# Altium footprint library Connector_SMD.PcbLib: 116 footprints (part 6 of 8)
Each footprint in its own frame and in the unit in brackets; x right, y up, seen from the top. Pads: shape width x height; smd on the part's side, far side on the other; paste and mask are expansions set on the pad; w line width, h text height; cw(c..) or ccw(c..) is an arc to the next point about the centre after c.
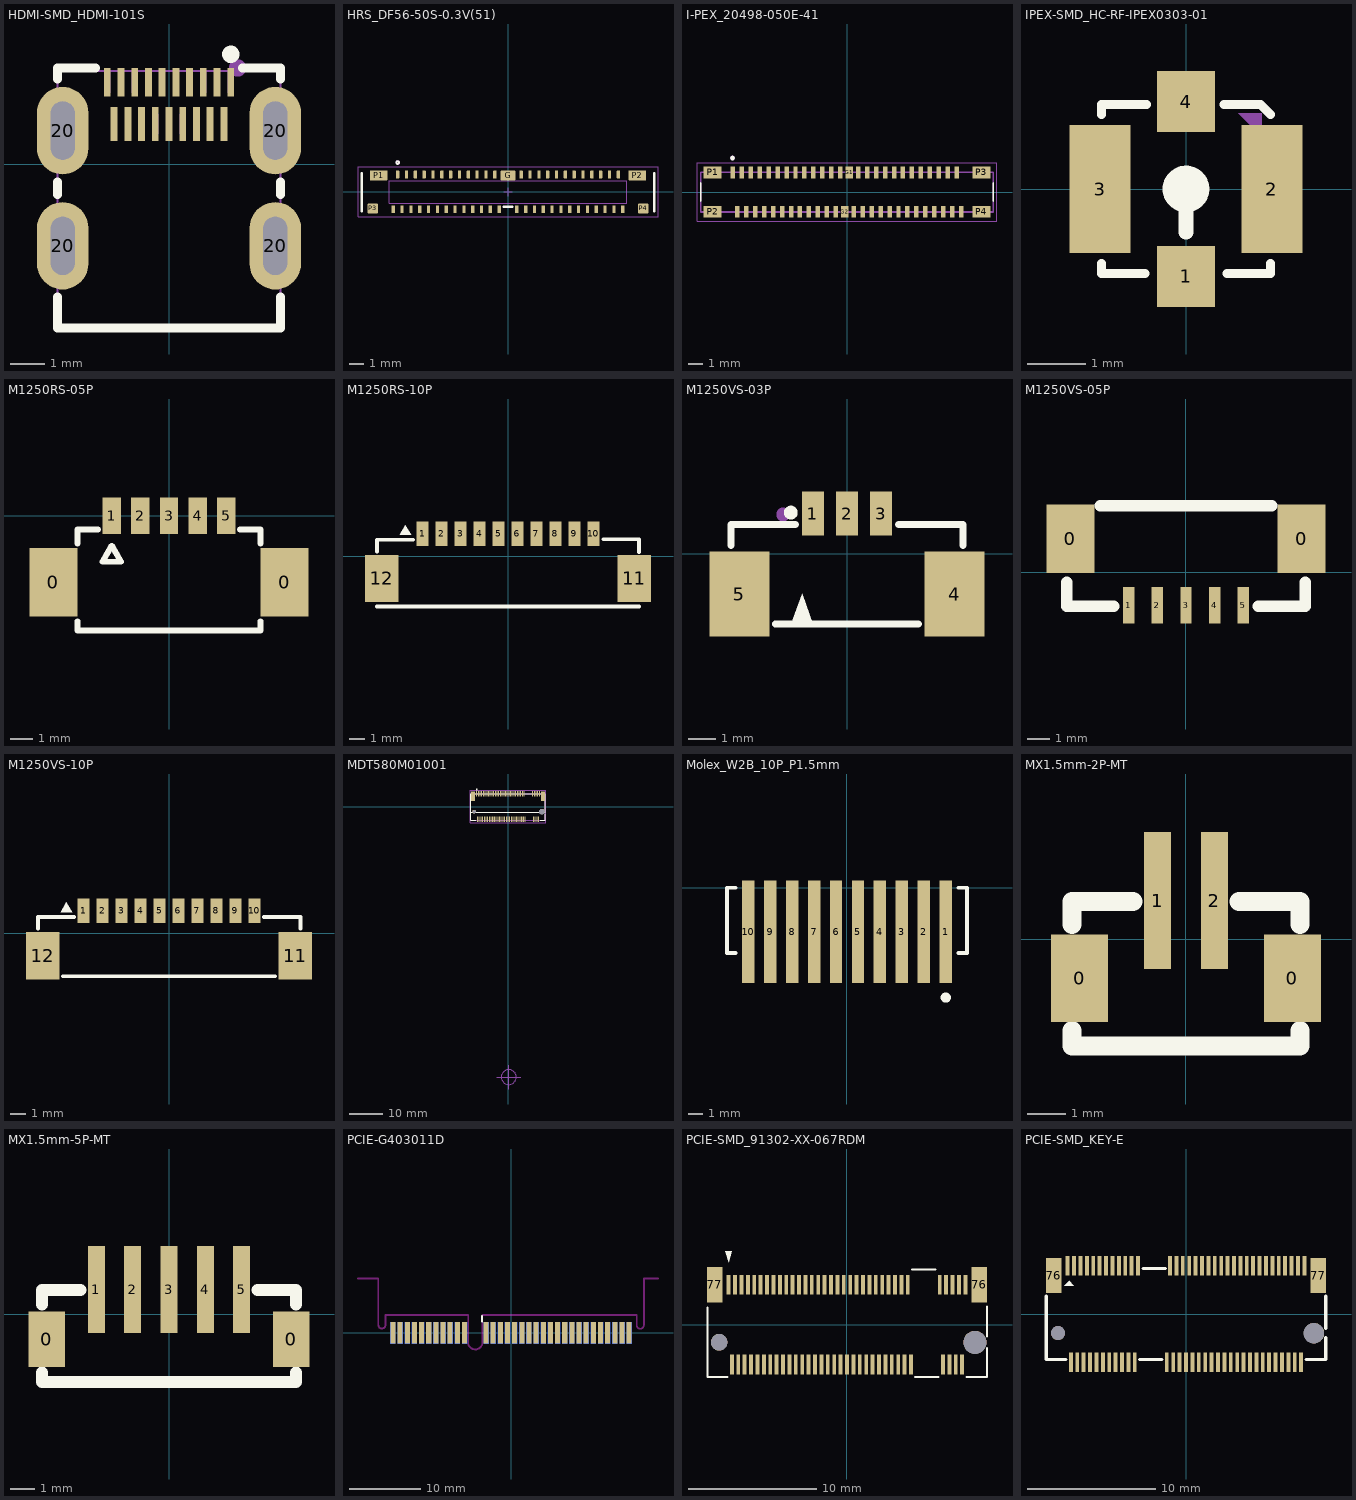
[diagram p5: the footprints below, top view; thin cyan lines are the x and y axes]

## HDMI-SMD_HDMI-101S [mm]
pads (23):
  rect 0.2x0.84 smd paste-100 mask+0.051: 1(1.8,2.385) 3(1.4,2.385) 5(1,2.385) 7(0.6,2.385) 9(0.2,2.385) 11(-0.2,2.385) 13(-0.6,2.385) 15(-1,2.385) 17(-1.4,2.385) 19(-1.8,2.385)
  rect 0.2x1 smd paste-100 mask+0.051: 2(1.6,1.165) 4(1.2,1.165) 6(0.8,1.165) 8(0.4,1.165) 10(0,1.165) 12(-0.4,1.165) 14(-0.8,1.165) 16(-1.2,1.165) 18(-1.6,1.165)
  oval 1.5x2.55 hole 0.7 slot 1.7 at 90 deg: 20(-3.1,-2.385) 20(-3.1,0.975) 20(3.1,-2.385) 20(3.1,0.975)
Top Overlay:
  circle w0.254: c1.8,3.2 r0.127
  lines w0.254: -3.25,-3.879 -3.25,-4.785 3.25,-4.785 3.25,-3.879 ; -3.25,-0.89 -3.25,-0.52 ; -3.25,2.47 -3.25,2.8 -2.146,2.8 ; 2.146,2.8 3.25,2.8 3.25,2.47 ; 3.25,-0.89 3.25,-0.52
Top Paste:
  drawing of 23 lines, arcs and shapes, not listed
Mechanical 6:
  circle w0.254: c2,2.8 r0.127
Mechanical 15:
  region: 3.31,2.715 3.31,2.74 3.275,2.775 3.225,2.775 3.19,2.74 3.19,2.715 3.19,2.69 3.225,2.655 3.275,2.655 3.31,2.69 3.31,2.715
  region: -1.68,1.465 -1.52,1.465 -1.52,0.865 -1.68,0.865
  region: -1.48,2.685 -1.32,2.685 -1.32,2.085 -1.48,2.085
  region: -1.28,1.465 -1.12,1.465 -1.12,0.865 -1.28,0.865
  region: -1.08,2.685 -0.92,2.685 -0.92,2.085 -1.08,2.085
  region: -0.88,1.465 -0.72,1.465 -0.72,0.865 -0.88,0.865
  region: -0.68,2.685 -0.52,2.685 -0.52,2.085 -0.68,2.085
  region: -0.48,1.465 -0.32,1.465 -0.32,0.865 -0.48,0.865
  region: -0.28,2.685 -0.12,2.685 -0.12,2.085 -0.28,2.085
  region: -0.08,1.465 0.08,1.465 0.08,0.865 -0.08,0.865
  region: 0.12,2.685 0.28,2.685 0.28,2.085 0.12,2.085
  region: 0.32,1.465 0.48,1.465 0.48,0.865 0.32,0.865
  region: 0.52,2.685 0.68,2.685 0.68,2.085 0.52,2.085
  region: 0.72,1.465 0.88,1.465 0.88,0.865 0.72,0.865
  region: 0.92,2.685 1.08,2.685 1.08,2.085 0.92,2.085
  region: 1.12,1.465 1.28,1.465 1.28,0.865 1.12,0.865
  region: 1.32,2.685 1.48,2.685 1.48,2.085 1.32,2.085
  region: 1.52,1.465 1.68,1.465 1.68,0.865 1.52,0.865
  region: 1.72,2.685 1.88,2.685 1.88,2.085 1.72,2.085
  region: -1.88,2.685 -1.72,2.685 -1.72,2.085 -1.88,2.085
  region: -3.25,1.525 -2.95,1.525 -2.95,0.425 -3.25,0.425
  region: 2.95,1.525 3.25,1.525 3.25,0.425 2.95,0.425
  region: 2.95,-1.785 3.25,-1.785 3.25,-2.985 2.95,-2.985
  region: -3.25,-1.785 -2.95,-1.785 -2.95,-2.985 -3.25,-2.985
  lines w0.051: -3.25,-4.785 3.25,-4.785 3.25,2.715 -3.25,2.715 -3.25,-4.785
3D body "PCBModelHDMI-SMD_HDMI-101S.step": height 3.05, standoff -0.7, extent -3.25,-4.74 3.26,2.76

## HRS_DF56-50S-0.3V(51) [mm]
pads (55):
  rrect20% 0.22x0.52 smd mask+0.05: 1(-7.5,1.185) 2(-6.9,1.185) 3(-6.3,1.185) 4(-5.7,1.185) 5(-5.1,1.185) 6(-4.5,1.185) 7(-3.9,1.185) 8(-3.3,1.185) 9(-2.7,1.185) 10(-2.1,1.185) 11(-1.5,1.185) 12(-0.9,1.185) 13(0.9,1.185) 14(1.5,1.185) 15(2.1,1.185) 16(2.7,1.185) 17(3.3,1.185) 18(3.9,1.185) 19(4.5,1.185) 20(5.1,1.185) 21(5.7,1.185) 22(6.3,1.185) 23(6.9,1.185) 24(7.5,1.185) 25(-7.8,-1.185) 26(-7.2,-1.185) 27(-6.6,-1.185) 28(-6,-1.185) 29(-5.4,-1.185) 30(-4.8,-1.185) 31(-4.2,-1.185) 32(-3.6,-1.185) 33(-3,-1.185) 34(-2.4,-1.185) 35(-1.8,-1.185) 36(-1.2,-1.185) 37(-0.6,-1.185) 38(0.6,-1.185) 39(1.2,-1.185) 40(1.8,-1.185) 41(2.4,-1.185) 42(3,-1.185) 43(3.6,-1.185) 44(4.2,-1.185) 45(4.8,-1.185) 46(5.4,-1.185) 47(6,-1.185) 48(6.6,-1.185) 49(7.2,-1.185) 50(7.8,-1.185)
  rrect20% 1x0.7 smd mask+0.05: G(0,1.125)
  rrect20% 1.2x0.7 smd mask+0.05: P1(-8.8,1.125) P2(8.8,1.125)
  rrect20% 0.7x0.7 smd mask+0.05: P3(-9.2,-1.125) P4(9.2,-1.125)
Top Overlay:
  circle w0.127: c-7.5,2 r0.089
  lines w0.152: -9.95,-1.31 -9.95,1.29 ; -0.3,-1 0.3,-1 ; 9.95,-1.31 9.95,1.29
Mechanical 7:
  lines w0.051: -8.06,-0.775 -8.06,0.775 8.06,0.775 8.06,-0.775 -8.06,-0.775
Mechanical 13:
  circle w0.127: c-7.5,2 r0.1
Mechanical 15:
  lines w0.051: -0.3,0 0.3,0 ; 0,-0.3 0,0.3 ; -10.2,-1.7 -10.2,1.7 10.2,1.7 10.2,-1.7 -10.2,-1.7
3D body "DF56-50S-0.3V.stp": height 1.24, standoff -0.01, extent -9.95,-1.31 9.95,1.29

## I-PEX_20498-050E-41 [mm]
pads (56):
  rect 0.3x0.8 smd paste-1: 1(-7.65,1.32) 2(-7.35,-1.32) 3(-7.05,1.32) 4(-6.75,-1.32) 5(-6.45,1.32) 6(-6.15,-1.32) 7(-5.85,1.32) 8(-5.55,-1.32) 9(-5.25,1.32) 10(-4.95,-1.32) 11(-4.65,1.32) 12(-4.35,-1.32) 13(-4.05,1.32) 14(-3.75,-1.32) 15(-3.45,1.32) 16(-3.15,-1.32) 17(-2.85,1.32) 18(-2.55,-1.32) 19(-2.25,1.32) 20(-1.95,-1.32) 21(-1.65,1.32) 22(-1.35,-1.32) 23(-1.05,1.32) 24(-0.75,-1.32) 25(-0.45,1.32) 26(0.45,-1.32) 27(0.75,1.32) 28(1.05,-1.32) 29(1.35,1.32) 30(1.65,-1.32) 31(1.95,1.32) 32(2.25,-1.32) 33(2.55,1.32) 34(2.85,-1.32) 35(3.15,1.32) 36(3.45,-1.32) 37(3.75,1.32) 38(4.05,-1.32) 39(4.35,1.32) 40(4.65,-1.32) 41(4.95,1.32) 42(5.25,-1.32) 43(5.55,1.32) 44(5.85,-1.32) 45(6.15,1.32) 46(6.45,-1.32) 47(6.75,1.32) 48(7.05,-1.32) 49(7.35,1.32) 50(7.65,-1.32)
  rect 0.5x0.8 smd paste-1: G1(0.15,1.32) G2(-0.15,-1.32)
  rect 1.2x0.8 smd paste-2: P1(-9,1.32) P2(-9,-1.32) P3(9,1.32) P4(9,-1.32)
Top Overlay:
  circle w0.127: c-7.67,2.28 r0.089
  lines w0.127: -9.8,-0.6 -9.8,0.6 ; 9.8,-0.6 9.8,0.6
Top Paste:
  drawing of 56 lines, arcs and shapes, not listed
Mechanical 13:
  circle w0.127: c-7.67,2.28 r0.1
  lines w0.127: -9.8,-1.325 -9.8,1.325 9.8,1.325 9.8,-1.325 -9.8,-1.325
Mechanical 15:
  lines w0.05: -10.05,-1.97 -10.05,1.97 10.05,1.97 10.05,-1.97 -10.05,-1.97
3D body "20496-050xxxC+20498-050ExxxC MATING STEP R1R2 ALL.STEP": height 1.24, standoff -0.03, extent -10,-3.04 10,1.45

## IPEX-SMD_HC-RF-IPEX0303-01 [mm]
pads (4):
  rect 1x1.05 smd: 1(0,-1.5) 4(0,1.5)
  rect 1.05x2.2 smd: 2(1.475,0) 3(-1.475,0)
Top Overlay:
  circle w0.4: c0,0 r0.2
  lines w0.152: -1.45,-1.28 -1.45,-1.3 -1.45,-1.45 -0.701,-1.45 ; -1.45,1.28 -1.45,1.4 -1.45,1.45 -1.4,1.45 -0.68,1.45 ; 0.65,1.45 1.1,1.45 1.28,1.45 1.45,1.28 1.447,1.28 1.277,1.45 ; 0.701,-1.45 1.097,-1.45 1.45,-1.45 1.45,-1.3 1.45,-1.28
  lines w0.254: 0,-0.744 0,-0.3
Mechanical 15:
  circle w0.4: c0,-1.45 r0.2
  region: 1.3,0.9 1.3,1.3 0.9,1.3

## M1250RS-05P [mm]
pads (7):
  rect 2.1x3 smd: 0(-5.05,-2.9) 0(5.05,-2.9)
  rect 0.8x1.6 smd: 1(-2.5,0) 2(-1.25,0) 3(0,0) 4(1.25,0) 5(2.5,0)
Top Overlay:
  lines w0.254: -4,-4.6 -4,-5 4,-5 4,-4.6 ; -4,-1.2 -4,-0.6 -3.1,-0.6 ; 3.1,-0.6 4,-0.6 4,-1.2 ; -2.9,-2 -2.1,-2 -2.5,-1.3 -2.9,-2
3D body: height 3.7, standoff 0, extent -4,-5 4,-0.6

## M1250RS-10P [mm]
pads (12):
  rect 0.8x1.6 smd: 1(-5.625,1.475) 2(-4.375,1.475) 3(-3.125,1.475) 4(-1.875,1.475) 5(-0.625,1.475) 6(0.625,1.475) 7(1.875,1.475) 8(3.125,1.475) 9(4.375,1.475) 10(5.625,1.475)
  rect 2.2x3.1 smd: 11(8.325,-1.475) 12(-8.325,-1.475)
Top Overlay:
  region: -6.751,2.032 -7.132,1.397 -6.37,1.397
  lines w0.254: -8.625,-3.325 8.625,-3.325 ; -8.625,0.306 -8.625,1.075 -6.256,1.075 ; 6.27,1.1 8.63,1.1 8.63,0.263
3D body "CN1.stp": height 3.41, standoff 0, extent -8.675,-3.475 8.675,1.675

## M1250VS-03P [mm]
pads (5):
  rect 0.8x1.6 smd: 1(-1.25,1.475) 2(0,1.475) 3(1.25,1.475)
  rect 2.2x3.1 smd: 4(3.95,-1.475) 5(-3.95,-1.475)
Top Overlay:
  circle w0.254: c-2.06,1.51 r0.127
  region: -2.05,-2.575 -1.25,-2.575 -1.65,-1.475
  lines w0.254: -4.25,0.306 -4.25,1.075 -1.881,1.075 ; -2.63,-2.58 2.62,-2.58 ; 1.881,1.075 4.25,1.075 4.25,0.306
Mechanical 15:
  circle w0.254: c-2.34,1.44 r0.127
3D body "CN1.stp": height 4.7, standoff 0, extent -4.45,-2.7 4.45,1.4

## M1250VS-05P [mm]
pads (7):
  rect 2.1x3 smd: 0(-5.05,1.45) 0(5.05,1.45)
  rect 0.5x1.6 smd: 1(-2.5,-1.45) 2(-1.25,-1.45) 3(0,-1.45) 4(1.25,-1.45) 5(2.5,-1.45)
Top Overlay:
  lines w0.5: -5.2,-0.45 -5.2,-1.5 -3.15,-1.5 ; -3.75,2.9 3.75,2.9 ; 3.15,-1.5 5.2,-1.5 5.2,-0.45
3D body: height 4.7, standoff 0, extent -5.2,-1.5 5.2,2.9

## M1250VS-10P [mm]
pads (12):
  rect 0.8x1.6 smd: 1(-5.625,1.475) 2(-4.375,1.475) 3(-3.125,1.475) 4(-1.875,1.475) 5(-0.625,1.475) 6(0.625,1.475) 7(1.875,1.475) 8(3.125,1.475) 9(4.375,1.475) 10(5.625,1.475)
  rect 2.2x3.1 smd: 11(8.325,-1.475) 12(-8.325,-1.475)
Top Overlay:
  region: -6.751,2.032 -7.132,1.397 -6.37,1.397
  lines w0.254: -8.625,0.306 -8.625,1.075 -6.256,1.075 ; -6.994,-2.825 6.994,-2.825 ; 6.25,1.07 8.648,1.07 8.648,0.303
Mechanical 15:
  circle w0.2: c-5.729,1.987 r0.1
3D body "CN1.stp": height 4.75, standoff 0, extent -8.675,-2.226 8.675,1.475

## MDT580M01001 [mm]
pads (71):
  rect 0.3x1.55 smd: 1(-9.25,3.775) 2(-9,-3.775) 3(-8.75,3.775) 4(-8.5,-3.775) 5(-8.25,3.775) 6(-8,-3.775) 7(-7.75,3.775) 8(-7.5,-3.775) 9(-7.25,3.775) 10(-7,-3.775) 11(-6.75,3.775) 12(-6.5,-3.775) 13(-6.25,3.775) 14(-6,-3.775) 15(-5.75,3.775) 16(-5.5,-3.775) 17(-5.25,3.775) 18(-5,-3.775) 19(-4.75,3.775) 20(-4.5,-3.775) 21(-4.25,3.775) 22(-4,-3.775) 23(-3.75,3.775) 24(-3.5,-3.775) 25(-3.25,3.775) 26(-3,-3.775) 27(-2.75,3.775) 28(-2.5,-3.775) 29(-2.25,3.775) 30(-2,-3.775) 31(-1.75,3.775) 32(-1.5,-3.775) 33(-1.25,3.775) 34(-1,-3.775) 35(-0.75,3.775) 36(-0.5,-3.775) 37(-0.25,3.775) 38(0,-3.775) 39(0.25,3.775) 40(0.5,-3.775) 41(0.75,3.775) 42(1,-3.775) 43(1.25,3.775) 44(1.5,-3.775) 45(1.75,3.775) 46(2,-3.775) 47(2.25,3.775) 48(2.5,-3.775) 49(2.75,3.775) 50(3,-3.775) 51(3.25,3.775) 52(3.5,-3.775) 53(3.75,3.775) 54(4,-3.775) 55(4.25,3.775) 56(4.5,-3.775) 57(4.75,3.775) 58(5,-3.775) 67(7.25,3.775) 68(7.5,-3.775) 69(7.75,3.775) 70(8,-3.775) 71(8.25,3.775) 72(8.5,-3.775) 73(8.75,3.775) 74(9,-3.775) 75(9.25,3.775)
  round 1.1 hole 1.1 unplated: None(-10,-1.5)
  round 1.6 hole 1.6 unplated: None(10,-1.5)
  rect 1.2x2.75 smd: SH1(-10.35,3) SH2(10.35,3)
Top Overlay:
  circle w0.2: c-9.225,5.075 r0.1
  lines w0.1: -10.95,-4 -10.95,-1.75 -8.76,-1.75
  lines w0.127: -10.95,1 -10.95,-4 -9.5,-4 ; -10.575,3.75 -6.175,3.75 ; -6.075,3.75 10.575,3.75 10.95,3.75 ; 6.075,-1.75 -10.575,-1.75 -10.95,-1.75 ; 6.175,-1.75 10.575,-1.75 10.95,-1.75 ; 9.5,-4 10.95,-4 10.95,-2.1 ; 10.95,-0.9 10.95,1 ; -10.95,-1.75 -10.95,3.75 ; -10.95,-1.75 -10.95,3.75 ; -10.95,3.75 10.95,3.75 ; 10.95,-1.75 10.95,3.75 ; 10.95,-1.75 10.95,3.75
Mechanical 3:
  circle w0.2: c0.223,-79.843 r2.209
  lines w0.2: -3.298,-79.843 0.223,-79.843 ; 0.223,-83.364 0.223,-79.843 ; 0.223,-76.323 0.223,-79.843 ; 3.743,-79.843 0.223,-79.843
Mechanical 4:
  circle w0.2: c-9.25,4.115 r0.1
  circle w0.2: c-9.25,4.115 r0.1
  lines w0.127: -10.95,-4 10.95,-4 ; -10.95,-4 -10.95,3.75 ; -10.95,-4 10.95,-4 ; -10.95,-4 -10.95,3.75 ; -10.95,3.75 10.95,3.75 ; -10.95,3.75 10.95,3.75 ; 10.95,-4 10.95,3.75 ; 10.95,-4 10.95,3.75
Mechanical 16:
  lines w0.05: -11.2,-4.8 11.2,-4.8 11.2,4.8 -11.2,4.8 -11.2,-4.8
3D body "M-mdt580m0x001.step": height 5.95, standoff -0.6, extent -10.99,-4.27 11.01,4.28

## Molex_W2B_10P_P1.5mm [mm]
pads (10):
  rect 0.85x7 smd paste-1 mask+0.102: 1(6.75,-3)
  rect 0.85x7 smd paste-1: 2(5.25,-3) 3(3.75,-3) 4(2.25,-3) 5(0.75,-3) 6(-0.75,-3) 7(-2.25,-3) 8(-3.75,-3) 9(-5.25,-3) 10(-6.75,-3)
Top Overlay:
  circle w0.5: c6.75,-7.5 r0.1
  lines w0.254: -7.6,-4.45 -8.2,-4.45 -8.2,0 -7.6,0 ; 7.6,-4.45 8.2,-4.45 8.2,0 7.6,0
Top Paste:
  rectangle: -7.175,-6.5 -6.325,-3.95
  rectangle: -7.175,-2.95 -6.325,0.5
  rectangle: -5.675,-6.5 -4.825,-3.95
  rectangle: -5.675,-2.95 -4.825,0.5
  rectangle: -4.175,-6.5 -3.325,-3.95
  rectangle: -4.175,-2.95 -3.325,0.5
  rectangle: -2.675,-6.5 -1.825,-3.95
  rectangle: -2.675,-2.95 -1.825,0.5
  rectangle: -1.175,-6.5 -0.325,-3.95
  rectangle: -1.175,-2.95 -0.325,0.5
  rectangle: 0.325,-6.5 1.175,-3.95
  rectangle: 0.325,-2.95 1.175,0.5
  rectangle: 1.825,-6.5 2.675,-3.95
  rectangle: 1.825,-2.95 2.675,0.5
  rectangle: 3.325,-6.5 4.175,-3.95
  rectangle: 3.325,-2.95 4.175,0.5
  rectangle: 4.825,-6.5 5.675,-3.95
  rectangle: 4.825,-2.95 5.675,0.5
  rectangle: 6.325,-2.95 7.175,0.5
  rectangle: 6.325,-6.5 7.175,-3.95
Top Solder:
  rectangle: 6.225,-6.6 7.275,-3.85
  rectangle: 6.225,-3.05 7.275,0.6
  rectangle: 4.725,-3.05 5.775,0.6
  rectangle: 4.725,-6.6 5.775,-3.85
  rectangle: 3.225,-3.05 4.275,0.6
  rectangle: 3.225,-6.6 4.275,-3.85
  rectangle: 1.725,-3.05 2.775,0.6
  rectangle: 1.725,-6.6 2.775,-3.85
  rectangle: 0.225,-3.05 1.275,0.6
  rectangle: 0.225,-6.6 1.275,-3.85
  rectangle: -1.275,-3.05 -0.225,0.6
  rectangle: -1.275,-6.6 -0.225,-3.85
  rectangle: -2.775,-3.05 -1.725,0.6
  rectangle: -2.775,-6.6 -1.725,-3.85
  rectangle: -4.275,-3.05 -3.225,0.6
  rectangle: -4.275,-6.6 -3.225,-3.85
  rectangle: -5.775,-3.05 -4.725,0.6
  rectangle: -5.775,-6.6 -4.725,-3.85
  region: -6.225,0.6 -7.275,0.6 -7.275,-3.05 -6.225,-3.05
  region: -6.225,-3.85 -7.275,-3.85 -7.275,-6.6 -6.225,-6.6
3D body "87437-1043.stp": height 5.77, standoff 0.02, extent -8.15,-6 8.15,0

## MX1.5mm-2P-MT [mm]
pads (4):
  rect 1.5x2.3 smd: 0(-2.8,-1.025) 0(2.8,-1.025)
  rect 0.7x3.6 smd: 1(-0.75,1.025) 2(0.75,1.025)
Top Overlay:
  lines w0.5: -3,-2.4 -3,-2.8 3,-2.8 3,-2.4 ; -3,0.4 -3,1 -1.4,1 ; 1.4,1 3,1 3,0.4
3D body: height 5, standoff 0, extent -3,-2.8 3,1

## MX1.5mm-5P-MT [mm]
pads (7):
  rect 1.5x2.3 smd: 0(-5.05,-1.025) 0(5.05,-1.025)
  rect 0.7x3.6 smd: 1(-3,1.025) 2(-1.5,1.025) 3(0,1.025) 4(1.5,1.025) 5(3,1.025)
Top Overlay:
  lines w0.5: -5.25,-2.4 -5.25,-2.8 5.25,-2.8 5.25,-2.4 ; -5.25,0.4 -5.25,1 -3.65,1 ; 3.65,1 5.25,1 5.25,0.4
3D body: height 5, standoff 0, extent -5.25,-2.8 5.25,1

## PCIE-G403011D [mil]
pads (64):
  rect 27.6x118.1 smd far side: A1(-649.6,0) A2(-610.2,0) A3(-570.8,0) A4(-531.4,0) A5(-492.1,0) A6(-452.7,0) A7(-413.3,0) A8(-374,0) A9(-334.6,0) A10(-295.2,0) A11(-255.9,0) A12(-137.7,0) A13(-98.4,0) A14(-59,0) A15(-19.6,0) A16(19.7,0) A17(59.1,0) A18(98.5,0) A19(137.8,0) A20(177.2,0) A21(216.6,0) A22(256,0) A23(295.3,0) A24(334.7,0) A25(374.1,0) A26(413.4,0) A27(452.8,0) A28(492.2,0) A29(531.5,0) A30(570.9,0) A31(610.3,0) A32(649.7,0)
  rect 27.6x118.1 smd: B1(-649.6,0) B2(-610.2,0) B3(-570.8,0) B4(-531.4,0) B5(-492.1,0) B6(-452.7,0) B7(-413.3,0) B8(-374,0) B9(-334.6,0) B10(-295.2,0) B11(-255.9,0) B12(-137.7,0) B13(-98.4,0) B14(-59,0) B15(-19.6,0) B16(19.7,0) B17(59.1,0) B18(98.5,0) B19(137.8,0) B20(177.2,0) B21(216.6,0) B22(256,0) B23(295.3,0) B24(334.7,0) B25(374.1,0) B26(413.4,0) B27(452.8,0) B28(492.2,0) B29(531.5,0) B30(570.9,0) B31(610.3,0) B32(649.7,0)
Top Overlay:
  lines w10: -159.4,63.5 -159.4,93.4
Keep-Out Layer:
  lines w10: -841.8,299.2 -730.3,299.2 -730.3,45.2 ; -730.1,43.4 ccw(c-710.6,43.4) -691.1,43.4 ; -691,43.4 -691,98.4 -235.3,98.4 -235.3,-59.3 ; -235.34,-59.3 ccw(c-196.8,-51.6) -158.55,-60.64 ; -158.6,-60.7 -158.2,98.4 691,98.4 691,39.8 ; 691,42.5 691.4,38.7 692.5,35 694.3,31.6 696.7,28.7 699.7,26.2 703.1,24.4 706.7,23.3 710.5,22.9 714.3,23.3 718,24.4 721.4,26.2 724.4,28.7 726.8,31.6 728.6,35 729.7,38.7 730.1,42.5 ; 730.4,97.1 730.4,43.2 730.4,299.2 ; 733.2,299.2 808.2,299.2
3D body "SMD_PCIE-G403011D.step": height 177.17, standoff -169.29, extent -767.91,-149.61 767.91,503.94

## PCIE-SMD_91302-XX-067RDM [mm]
pads (71):
  rect 0.3x1.55 smd: 1(-9.25,3.114) 2(-9,-3.115) 3(-8.75,3.114) 4(-8.5,-3.115) 5(-8.25,3.114) 6(-8,-3.115) 7(-7.75,3.114) 8(-7.5,-3.115) 9(-7.25,3.114) 10(-7,-3.115) 11(-6.75,3.114) 12(-6.5,-3.115) 13(-6.25,3.114) 14(-6,-3.115) 15(-5.75,3.114) 16(-5.5,-3.115) 17(-5.25,3.114) 18(-5,-3.115) 19(-4.75,3.114) 20(-4.5,-3.115) 21(-4.25,3.114) 22(-4,-3.115) 23(-3.75,3.114) 24(-3.5,-3.115) 25(-3.25,3.114) 26(-3,-3.115) 27(-2.75,3.114) 28(-2.5,-3.115) 29(-2.25,3.114) 30(-2,-3.115) 31(-1.75,3.114) 32(-1.5,-3.115) 33(-1.25,3.114) 34(-1,-3.115) 35(-0.75,3.114) 36(-0.5,-3.115) 37(-0.25,3.114) 38(0,-3.115) 39(0.25,3.114) 40(0.5,-3.115) 41(0.75,3.114) 42(1,-3.115) 43(1.25,3.114) 44(1.5,-3.115) 45(1.75,3.114) 46(2,-3.115) 47(2.25,3.114) 48(2.5,-3.115) 49(2.75,3.114) 50(3,-3.115) 51(3.25,3.114) 52(3.5,-3.115) 53(3.75,3.114) 54(4,-3.115) 55(4.25,3.114) 56(4.5,-3.115) 57(4.75,3.114) 58(5,-3.115) 67(7.25,3.114) 68(7.5,-3.115) 69(7.75,3.114) 70(8,-3.115) 71(8.25,3.114) 72(8.5,-3.115) 73(8.75,3.114) 74(9,-3.115) 75(9.25,3.114)
  rect 1.2x2.75 smd: 76(10.35,3.115) 77(-10.35,3.115)
  round 1.3 hole 1.3 unplated: ""(-10,-1.386)
  round 1.8 hole 1.8 unplated: ""(10,-1.386)
Top Overlay:
  region: -9,5.74 -9.5,5.74 -9.25,4.865
  lines w0.15: -10.92,1.33 -10.92,-4.09 -9.329,-4.09 ; 5.08,4.29 6.92,4.29 ; 5.329,-4.09 7.171,-4.09 ; 9.329,-4.09 10.94,-4.09 10.94,-1.829 ; 10.94,-0.941 10.94,1.43
Mechanical 15:
  circle w0.725: c10,-1.386 r0.363
  circle w0.475: c-10,-1.386 r0.238

## PCIE-SMD_KEY-E [mm]
pads (71):
  rect 0.3x1.55 smd: 1(-9.25,3.775) 2(-9,-3.775) 3(-8.75,3.775) 4(-8.5,-3.775) 5(-8.25,3.775) 6(-8,-3.775) 7(-7.75,3.775) 8(-7.5,-3.775) 9(-7.25,3.775) 10(-7,-3.775) 11(-6.75,3.775) 12(-6.5,-3.775) 13(-6.25,3.775) 14(-6,-3.775) 15(-5.75,3.775) 16(-5.5,-3.775) 17(-5.25,3.775) 18(-5,-3.775) 19(-4.75,3.775) 20(-4.5,-3.775) 21(-4.25,3.775) 22(-4,-3.775) 23(-3.75,3.775) 32(-1.5,-3.775) 33(-1.25,3.775) 34(-1,-3.775) 35(-0.75,3.775) 36(-0.5,-3.775) 37(-0.25,3.775) 38(0,-3.775) 39(0.25,3.775) 40(0.5,-3.775) 41(0.75,3.775) 42(1,-3.775) 43(1.25,3.775) 44(1.5,-3.775) 45(1.75,3.775) 46(2,-3.775) 47(2.25,3.775) 48(2.5,-3.775) 49(2.75,3.775) 50(3,-3.775) 51(3.25,3.775) 52(3.5,-3.775) 53(3.75,3.775) 54(4,-3.775) 55(4.25,3.775) 56(4.5,-3.775) 57(4.75,3.775) 58(5,-3.775) 59(5.25,3.775) 60(5.5,-3.775) 61(5.75,3.775) 62(6,-3.775) 63(6.25,3.775) 64(6.5,-3.775) 65(6.75,3.775) 66(7,-3.775) 67(7.25,3.775) 68(7.5,-3.775) 69(7.75,3.775) 70(8,-3.775) 71(8.25,3.775) 72(8.5,-3.775) 73(8.75,3.775) 74(9,-3.775) 75(9.25,3.775)
  rect 1.2x2.75 smd: 76(-10.35,3) 77(10.35,3)
  round 1.1 hole 1.1 unplated: ""(-10,-1.5)
  round 1.6 hole 1.6 unplated: ""(10,-1.5)
Top Overlay:
  region: -9.144,2.604 -9.525,2.223 -8.763,2.223
  lines w0.254: -10.922,1.394 -10.922,-3.556 -9.381,-3.556 ; -3.619,-3.556 -1.881,-3.556 ; -3.369,3.556 -1.631,3.556 ; 9.381,-3.556 10.922,-3.556 10.922,-1.864 ; 10.922,-1.136 10.922,1.394